# Altium footprint library PcbLib.PcbLib: 162 footprints (part 8 of 11)
Each footprint in its own frame and in the unit in brackets; x right, y up, seen from the top. Pads: shape width x height; smd on the part's side, far side on the other; paste and mask are expansions set on the pad; w line width, h text height; cw(c..) or ccw(c..) is an arc to the next point about the centre after c.
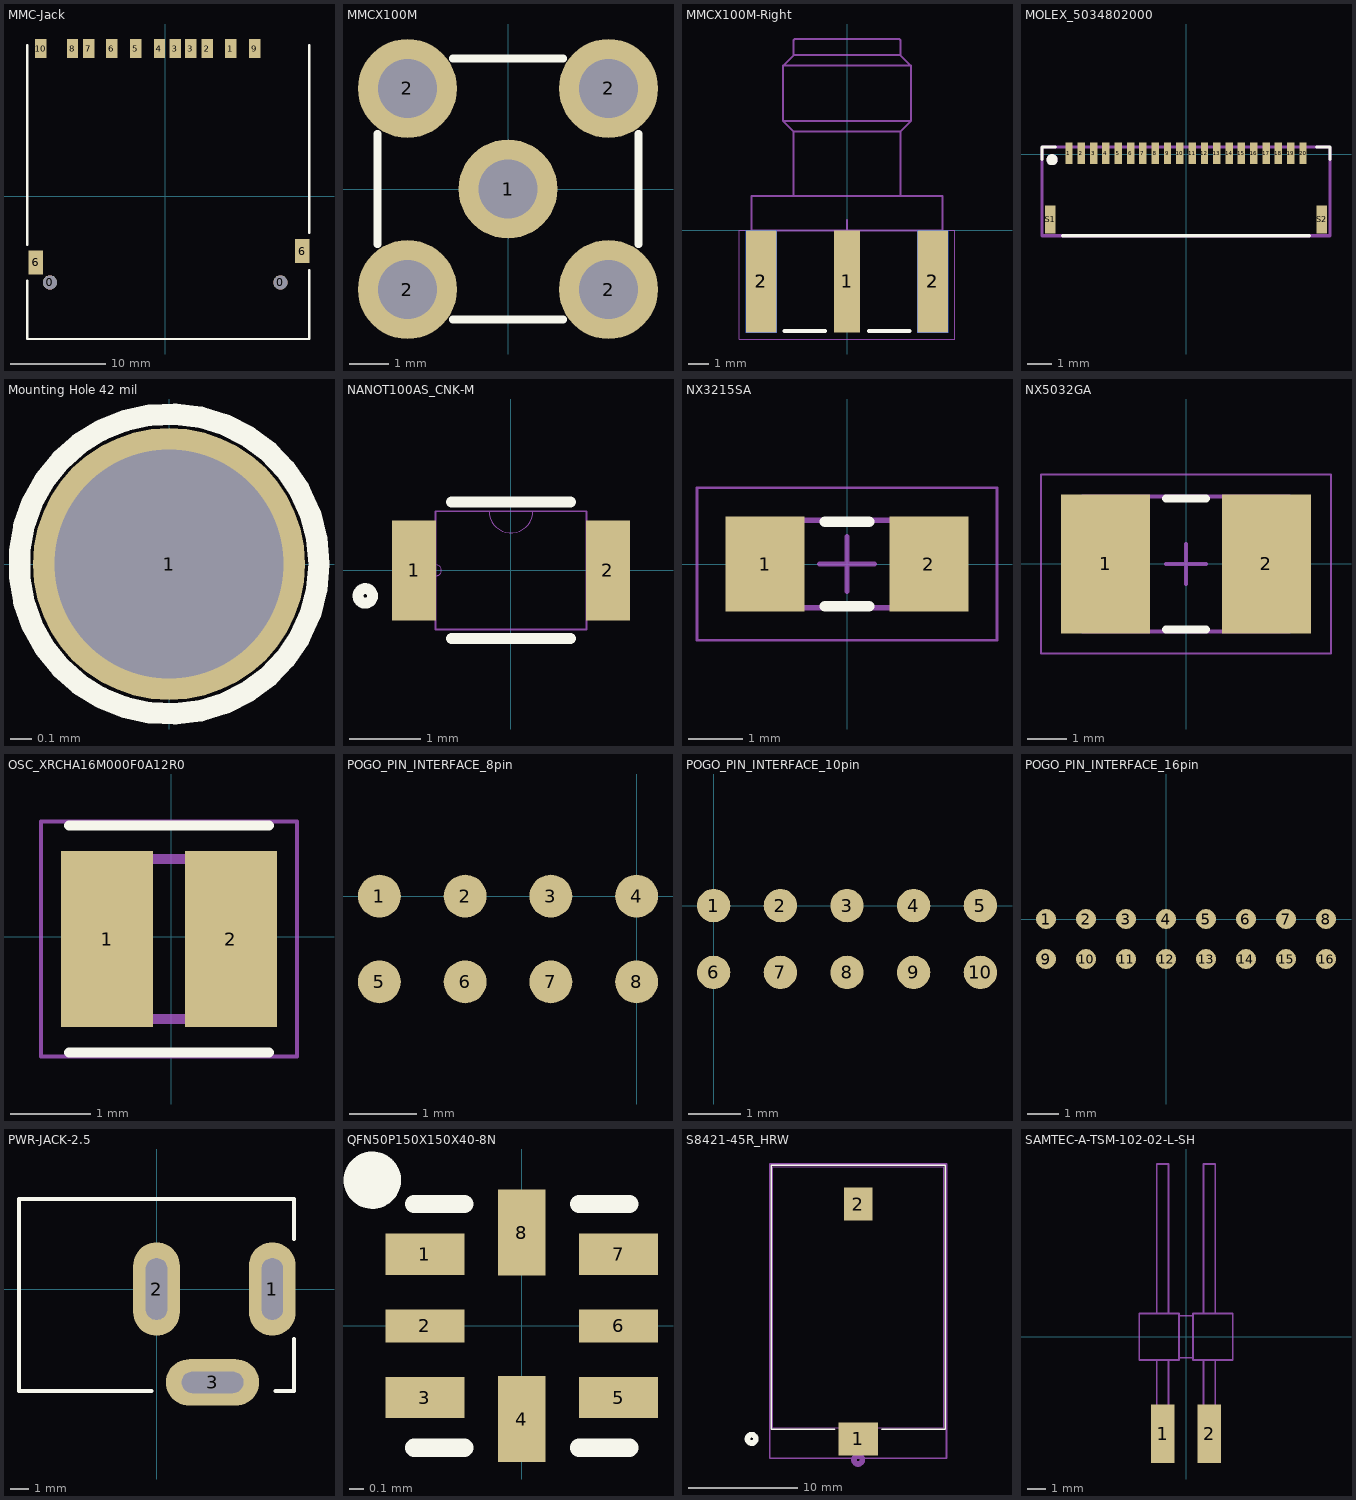
[diagram p7: the footprints below, top view; thin cyan lines are the x and y axes]

## MMC-Jack [mm] "Multi Media Memory Card Jack"
height 3
pads (15):
  round 1.5 hole 1.5: 0(-12.1,-9.05) 0(12.1,-9.05)
  rect 1.2x2 smd: 1(6.9,15.51) 2(4.4,15.51) 3(1.05,15.51) 3(2.7,15.51) 4(-0.6,15.51) 5(-3.1,15.51) 6(-5.6,15.51) 7(-8.03,15.51) 8(-9.73,15.51) 9(9.4,15.51) 10(-13.08,15.51)
  rect 1.5x2.5 smd: 6(-13.6,-6.95) 6(14.4,-5.75)
Top Overlay:
  lines w0.254: -14.478,-8.89 -14.478,-14.986 15.113,-14.986 15.113,-7.747 ; -14.478,-5.08 -14.478,15.875 ; 15.113,-3.81 15.113,15.875
3D body "socket_a-sd-09-c-a-1-3.stp": height 2.65, standoff -0.7, extent -14.1,-14.605 14.7,15.695

## MMCX100M [mm] "Connector; RF Coaxial, MMCX, Thru-Hole; 5 Position; Vertical"
height 4.45
pads (5):
  round 2.5 hole 1.5: 1(0,0) 2(-2.54,-2.54) 2(-2.54,2.54) 2(2.54,-2.54) 2(2.54,2.54)
Top Overlay:
  lines w0.2: -3.302,-1.397 -3.302,1.397 ; -1.397,-3.302 1.397,-3.302 ; -1.397,3.302 1.397,3.302 ; 3.302,-1.397 3.302,1.397
3D body "User Library-sma.STEP": height 9.58, standoff -3.87, extent -3.155,-3.155 3.155,3.155

## MMCX100M-Right [mil] "Connector; RF Coaxial, MMCX, Thru-Hole; 5 Position; Vertical"
height 175.2
pads (5):
  rect 50x200 smd: 1(0,-100)
  rect 60x200 smd: 2(-167.5,-100) 2(167.5,-100)
  rect 60x200 smd far side paste-78.74: 2(-167.5,-100) 2(167.5,-100)
Top Overlay:
  lines w7.87: -122.05,-196.85 -43.31,-196.85 ; 43.31,-196.85 122.05,-196.85
Mechanical 3:
  lines w1.97: -210.63,0 210.63,0
Mechanical 13:
  lines w3.94: -147.64,0 -147.64,-187.01 -187.01,-187.01 -187.01,0 ; -104.34,66.92 -104.34,192.9 ; -18.11,0 -18.11,-187.01 18.11,-187.01 18.11,0 ; 104.34,66.92 104.34,192.9 ; 147.64,0 147.64,-187.01 187.01,-187.01 187.01,0 ; -187.01,-0.01 -187.01,66.92 187,66.92 187.01,0 ; -187.01,0 187.01,0 ; -125,213.57 125,213.57 ; -125,213.57 -104.34,192.9 ; -125,213.57 -125,321.84 ; -125,321.84 -104.34,342.51 ; -125,321.84 125,321.84 ; -104.34,192.9 104.34,192.9 ; -104.34,342.51 104.34,342.51 ; -104.34,342.51 -104.34,372.04 -102.37,374.01 102.37,374.01 104.34,372.04 104.34,342.51 ; 104.34,192.9 125,213.57 ; 104.34,342.51 125,321.84 ; 125,213.57 125,321.84
Mechanical 15:
  lines w1.97: -210.63,0 -210.63,-212.6 210.63,-212.6 210.63,0
  lines w3.94: -19.68,0 19.68,0 ; 0,-19.68 0,19.68
3D body "32k145-400l5.stp": height 175.59, standoff -145.67, extent -187.01,-187.01 187.01,374.02

## MOLEX_5034802000 [mm]
pads (22):
  rect 0.3x0.878 smd: 1(-4.75,0.051) 2(-4.25,0.051) 3(-3.75,0.051) 4(-3.25,0.051) 5(-2.75,0.051) 6(-2.25,0.051) 7(-1.75,0.051) 8(-1.25,0.051) 9(-0.75,0.051) 10(-0.25,0.051) 11(0.25,0.051) 12(0.75,0.051) 13(1.25,0.051) 14(1.75,0.051) 15(2.25,0.051) 16(2.75,0.051) 17(3.25,0.051) 18(3.75,0.051) 19(4.25,0.051) 20(4.75,0.051)
  rect 0.427x1.152 smd: S1(-5.512,-2.642) S2(5.512,-2.642)
Top Overlay:
  circle w0.25: c-5.435,-0.216 r0.1
  lines w0.127: -5.85,-0.203 -5.85,0.3 -5.3,0.3 ; -5,-3.3 5,-3.3 ; 5.3,0.3 5.85,0.3 5.85,-0.203
Mechanical 13:
  circle w0.25: c-5.435,-0.216 r0.1
  lines w0.127: -5.85,-3.3 5.85,-3.3 5.85,0.3 -5.85,0.3 -5.85,-3.3
3D body "503480-2000.stp": height 1.89, standoff -0.01, extent -5.85,-3.302 5.85,0.298

## Mounting Hole 42 mil [mil] "Hole for Scrows"
pads (1):
  round 50 hole 42: 1(0,0)
Top Overlay:
  circle w3.94: c0,0 r27.56

## NANOT100AS_CNK-M [mil]
pads (2):
  rect 24x55 smd paste+0 mask+4: 1(-53.21,0) 2(53.21,0)
Top Overlay:
  circle w6: c-80,-14 r4
  lines w6: -32.75,-37.5 32.75,-37.5 ; -32.75,37.5 32.75,37.5
Mechanical 13:
  circle w0: c-41.21,0 r3
  lines w0: -12,32.5 ccw(c0,32.5) 12,32.5
  lines w1: -41.5,-32.5 -41.5,32.5 41.5,32.5 41.5,-32.5 -41.5,-32.5
3D body "NANOT100AS_CNK.step": height 22.09, standoff 0, extent -49.21,-32.52 49.21,32.52

## NX3215SA [mm] "Crystal, 2-Leads, Body 3.20x1.50mm"
height 0.9
pads (2):
  rect 1.45x1.75 smd: 1(-1.5,0) 2(1.5,0)
Top Overlay:
  lines w0.2: -0.4,-0.775 0.4,-0.775 ; -0.4,0.775 0.4,0.775
Mechanical 13:
  lines w0.1: -1.65,-0.8 -1.65,0.8 1.65,0.8 1.65,-0.8 -1.65,-0.8
Mechanical 15:
  lines w0.05: -2.75,-1.4 -2.75,1.4 2.75,1.4 2.75,-1.4 -2.75,-1.4
  lines w0.1: -0.5,0 0.5,0 ; 0,-0.5 0,0.5
3D body "User Library-NDK_NX3215SA.STEP": height 0.8, standoff 0, extent -1.6,-0.75 1.6,0.75

## NX5032GA [mm] "Crystal. 2-Leads, Body 5.00x3.20mm"
height 1.5
pads (2):
  rect 2.25x3.5 smd: 1(-2.025,0) 2(2.025,0)
Top Overlay:
  lines w0.2: -0.5,-1.65 0.5,-1.65 ; -0.5,1.65 0.5,1.65
Mechanical 13:
  lines w0.1: -2.6,-1.7 -2.6,1.7 2.6,1.7 2.6,-1.7 -2.6,-1.7
Mechanical 15:
  lines w0.05: -3.65,-2.25 -3.65,2.25 3.65,2.25 3.65,-2.25 -3.65,-2.25
  lines w0.1: -0.5,0 0.5,0 ; 0,-0.5 0,0.5
3D body "User Library-050004956.STEP": height 1, standoff -0.01, extent -2.5,-1.6 2.5,1.6

## OSC_XRCHA16M000F0A12R0 [mm]
pads (2):
  rect 1.15x2.2 smd: 1(-0.8,-0.025) 2(0.75,-0.025)
Top Overlay:
  lines w0.127: -1.275,-1.445 1.225,-1.445 ; -1.275,1.395 1.225,1.395
Mechanical 13:
  lines w0.127: -1.275,-1.025 1.225,-1.025 1.225,0.975 -1.275,0.975 -1.275,-1.025
Mechanical 15:
  lines w0.05: -1.625,-1.495 -1.625,1.445 1.575,1.445 1.575,-1.495 -1.625,-1.495
3D body "step_temp.STEP": height 0.8, standoff 0, extent -1.275,-1.025 1.225,0.975

## POGO_PIN_INTERFACE_8pin [mm]
pads (8):
  round 0.635 smd: 1(-3.81,0) 2(-2.54,0) 3(-1.27,0) 4(0,0) 5(-3.81,-1.27) 6(-2.54,-1.27) 7(-1.27,-1.27) 8(0,-1.27)

## POGO_PIN_INTERFACE_10pin [mm]
pads (10):
  round 0.635 smd: 1(0,0) 2(1.27,0) 3(2.54,0) 4(3.81,0) 5(5.08,0) 6(0,-1.27) 7(1.27,-1.27) 8(2.54,-1.27) 9(3.81,-1.27) 10(5.08,-1.27)

## POGO_PIN_INTERFACE_16pin [mm]
pads (16):
  round 0.635 smd: 1(-3.81,0) 2(-2.54,0) 3(-1.27,0) 4(0,0) 5(1.27,0) 6(2.54,0) 7(3.81,0) 8(5.08,0) 9(-3.81,-1.27) 10(-2.54,-1.27) 11(-1.27,-1.27) 12(0,-1.27) 13(1.27,-1.27) 14(2.54,-1.27) 15(3.81,-1.27) 16(5.08,-1.27)

## PWR-JACK-2.5 [mm] "Through Hole On Board Power Jack"
height 12
pads (3):
  oval 2.5x5 hole 1.143 slot 3.302 at 90 deg: 1(6.2,0) 2(0,0)
  oval 5x2.5 hole 1.143 slot 3.302 at 0 deg: 3(3,-5)
Top Overlay:
  lines w0.2: -0.254,-5.461 -7.366,-5.461 -7.366,4.826 7.366,4.826 7.366,2.667 ; 6.35,-5.461 7.366,-5.461 7.366,-2.667
Mechanical 1:
  lines w1: 0,-1 0,1 ; 2,-5 4,-5 ; 6.2,-1.25 6.2,1.25
Mechanical 2:
  lines w2.016: 0,-1 0,1 ; 2,-5 4,-5 ; 6.2,-1.25 6.2,1.25
3D body "User Library-DC POWER JACK.STEP": height 11.18, standoff -3.6, extent -7.493,-5.027 6.985,4.445

## QFN50P150X150X40-8N [mm]
pads (8):
  rect 0.55x0.287 smd mask+0.076: 1(-0.675,0.5) 3(-0.675,-0.5) 5(0.675,-0.5) 7(0.675,0.5)
  rect 0.55x0.229 smd mask+0.076: 2(-0.675,0) 6(0.675,0)
  rect 0.33x0.6 smd mask+0.076: 4(0,-0.65) 8(0,0.65)
Top Overlay:
  circle w0.2: c-1.041,1.016 r0.1
  lines w0.127: -0.75,-0.85 -0.4,-0.85 ; -0.75,0.85 -0.4,0.85 ; 0.4,-0.85 0.75,-0.85 ; 0.4,0.85 0.75,0.85
3D body "TLV8542RUGR.STEP": height 0.41, standoff 0.01, extent -0.75,-0.75 0.75,0.75

## S8421-45R_HRW [mil]
pads (2):
  rect 142x118 smd paste+0 mask+0: 1(1065,-6452.68)
  rect 102x118 smd paste+0 mask+0: 2(1065,-5610.16)
Top Overlay:
  circle w20: c683,-6452.68 r15
  lines w6: 980.9,-6418.5 753,-6418.5 753,-5471.5 1377,-5471.5 1377,-6418.5 1149.1,-6418.5
Bottom Overlay:
  circle w20: c683,-6452.68 r15
Mechanical 13:
  circle w20: c1065,-6527.68 r15
  lines w1: 758,-6413.5 1372,-6413.5 1372,-5476.5 758,-5476.5 758,-6413.5
Mechanical 15:
  lines w6: 748,-6521.68 748,-5466.5 1382,-5466.5 1382,-6521.68 748,-6521.68
3D body "s8421-45r_asm.stp": height 209.16, standoff -0.68, extent 758.01,-6446.47 1371.99,-5476
3D body: height 10, standoff 0, extent 1065,-5945 1075,-5935

## SAMTEC-A-TSM-102-02-L-SH [mm]
pads (2):
  rect 1.27x3.18 smd: 1(-1.27,-5.283) 2(1.27,-5.283)
Top Paste:
  rectangle: 0.635,-6.873 1.905,-3.693
  rectangle: -1.905,-6.873 -0.635,-3.693
Top Solder:
  rectangle: 0.584,-6.924 1.956,-3.642
  rectangle: -1.956,-6.924 -0.584,-3.642
Mechanical 16:
  lines w0.1: -1.588,-1.27 -1.588,-6.096 -0.952,-6.096 -0.952,-1.27 ; -1.588,1.27 -1.588,9.398 -0.952,9.398 -0.952,1.27 ; -0.381,-1.143 0,-1.143 0.381,-1.143 ; -0.381,1.143 0,1.143 0.381,1.143 ; 0.952,-1.27 0.952,-6.096 1.588,-6.096 1.588,-1.27 ; 0.952,1.27 0.952,9.398 1.588,9.398 1.588,1.27 ; -2.54,-1.27 -0.381,-1.27 -0.381,1.27 -2.54,1.27 -2.54,-1.27 ; 0.381,-1.27 0.381,1.27 2.54,1.27 2.54,-1.27 0.381,-1.27
3D body "TSM-102-02-L-SH.stp": height 3.06, standoff 0.01, extent -2.54,-6.731 2.54,8.763